# Altium footprint library FootPrintLib_12.PcbLib: 319 footprints (part 7 of 20)
Each footprint in its own frame and in the unit in brackets; x right, y up, seen from the top. Pads: shape width x height; smd on the part's side, far side on the other; paste and mask are expansions set on the pad; w line width, h text height; cw(c..) or ccw(c..) is an arc to the next point about the centre after c.
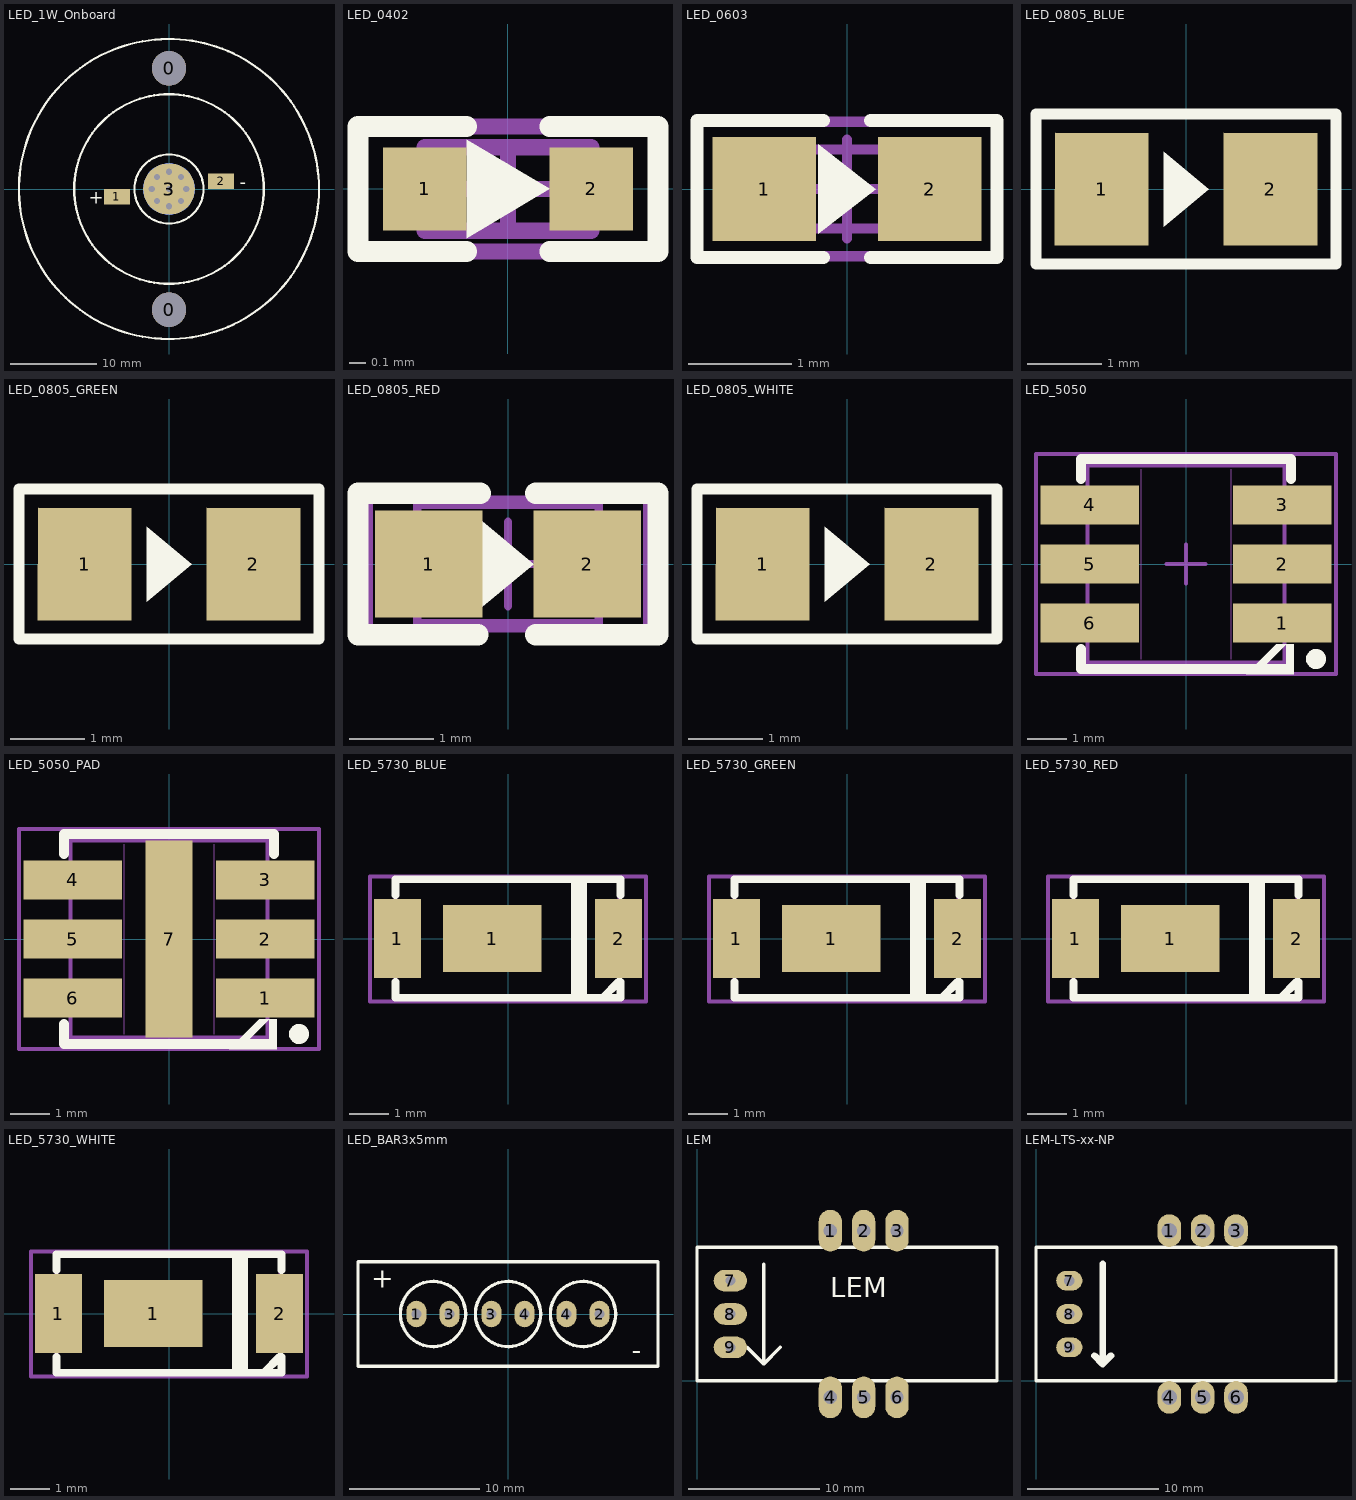
[diagram p6: the footprints below, top view; thin cyan lines are the x and y axes]

## LED_1W_Onboard [mm]
pads (6):
  round 4 hole 4: 0(0,-14) 0(0,14)
  rect 3.048x1.778 smd: 1(-6.032,-0.889) 2(6.032,0.889)
  round 6 smd: 3(0,0)
  round 6 smd far side: 3(0,0)
via 1.4,-1.4 diameter 1.27 hole 0.711
via -1.4,-1.4 diameter 1.27 hole 0.711
via -1.4,1.4 diameter 1.27 hole 0.711
via 1.4,1.4 diameter 1.27 hole 0.711
via 0,-2 diameter 1.27 hole 0.711
via 0,2 diameter 1.27 hole 0.711
via -2,0 diameter 1.27 hole 0.711
via 2,0 diameter 1.27 hole 0.711
via 0,0 diameter 1.27 hole 0.711
Top Overlay:
  circle w0.254: c0,0 r17.4
  circle w0.254: c0,0 r4
  circle w0.254: c0,0 r11
  text "-" at 8.2,0.1 h1.52
  text "+" at -9.3,-1.7 h1.52

## LED_0402 [mil] "Surface mount LED 0402"
height 11.81
pads (2):
  rect 20x20 smd: 1(-20,0) 2(20,0)
Top Overlay:
  region: -9.84,11.81 10,0 -9.84,-11.81
  lines w5: -10,-15 -36,-15 -36,15 -10,15 ; 10,-15 36,-15 36,15 10,15
Mechanical 13:
  lines w3.94: -20,-10 20,-10 20,10 -20,10 -20,-10
Mechanical 15:
  lines w3.94: -10,0 10,0 ; 0,-10 0,10 ; -36,-15 36,-15 36,15 -36,15 -36,-15
3D body "User Library-0402(1005M) LED.step": height 17.72, standoff 0, extent -19.88,-9.84 19.89,9.85

## LED_0603 [mm] "Surface mount LED 0603"
height 0.85
pads (2):
  rect 1x1 smd: 1(-0.8,0) 2(0.8,0)
Top Overlay:
  region: -0.279,0.432 0.279,0 -0.279,-0.432
  lines w0.127: -0.229,-0.66 -1.448,-0.66 -1.448,0.66 -0.229,0.66 ; 0.229,-0.66 1.448,-0.66 1.448,0.66 0.229,0.66
Mechanical 13:
  lines w0.1: -1.016,-0.381 -1.016,0.381 1.016,0.381 1.016,-0.381 -1.016,-0.381
Mechanical 15:
  lines w0.1: -0.475,0 0.475,0 ; 0,-0.475 0,0.475 ; -1.448,-0.65 -1.448,0.65 1.448,0.65 1.448,-0.65 -1.448,-0.65
3D body "User Library-0603(1608M) LED.step": height 0.6, standoff 0, extent -0.81,-0.4 0.81,0.4

## LED_0805_BLUE [mil] "Surface mount LED 0805"
height 109.84
pads (2):
  rect 50x60 smd: 1(-45,0) 2(45,0)
Top Overlay:
  region: -12,20 12,0 -12,-20
  lines w6: -80,-40 -80,40 80,40 80,-40 -80,-40
3D body "SW3dPS-APA3010GCCK_BLUE.STEP": height 76.77, standoff -1.97, extent -59.05,-19.58 59.06,19.59

## LED_0805_GREEN [mil] "Surface mount LED 0805"
height 109.84
pads (2):
  rect 50x60 smd: 1(-45,0) 2(45,0)
Top Overlay:
  region: -12,20 12,0 -12,-20
  lines w6: -80,-40 -80,40 80,40 80,-40 -80,-40
3D body "SW3dPS-led805.STEP": height 43.31, standoff -0.5, extent -40,-24.99 40,25

## LED_0805_RED [mil] "Surface mount LED 0805"
height 60
pads (2):
  rect 50x50 smd: 1(-37,0) 2(37,0)
Top Overlay:
  region: -12,20 12,0 -12,-20
  lines w10: -14,-33 -70,-33 -70,33 -13,33 ; 13,-33 70,-33 70,33 13,33
Mechanical 13:
  lines w3.94: -42.32,-27.56 42.32,-27.56 42.32,27.56 -42.32,27.56 -42.32,-27.56
Mechanical 15:
  lines w3.94: -19.69,0 19.68,0 ; 0,-19.68 0,19.69 ; -65,-30 65,-30 65,30 -65,30 -65,-30
3D body "User Library-CHIPLED-0805.STEP": height 35.43, standoff -0.39, extent -41.34,-26.57 41.33,26.58

## LED_0805_WHITE [mil] "Surface mount LED 0805"
height 109.84
pads (2):
  rect 50x60 smd: 1(-45,0) 2(45,0)
Top Overlay:
  region: -12,20 12,0 -12,-20
  lines w6: -80,-40 80,-40 80,40 -80,40 -80,-40
3D body "SW3dPS-LED_SMD_SML010L.STEP": height 53.52, standoff 0.38, extent -64.96,-27.56 64.96,29.53

## LED_5050 [mm] "SMT LED"
height 1.3
pads (6):
  rect 2.5x1 smd: 1(2.45,-1.5) 2(2.45,0) 3(2.45,1.5) 4(-2.45,1.5) 5(-2.45,0) 6(-2.45,-1.5)
Top Overlay:
  circle w0.254: c3.302,-2.413 r0.127
  region: 1.524,-2.794 2.73,-2.794 2.73,-2.032 2.54,-2.032 2.54,-2.54 2.032,-2.54 2.54,-2.032 2.286,-2.032
  lines w0.254: -2.667,-2.159 -2.667,-2.667 1.778,-2.667 ; -2.667,2.159 -2.667,2.667 2.667,2.667 2.667,2.159
Mechanical 13:
  lines w0.02: -1.143,-2.413 -1.143,2.413 ; 1.143,-2.413 1.143,2.413
  lines w0.1: -2.5,-2.5 -2.5,2.5 2.5,2.5 2.5,-2.5 -2.5,-2.5
Mechanical 15:
  lines w0.1: -0.5,0 0.5,0 ; 0,-0.5 0,0.5 ; -3.81,-2.794 -3.81,2.794 3.81,2.794 3.81,-2.794 -3.81,-2.794
3D body "User Library-LED-SMD-5050.step": height 1.6, standoff 0, extent -2.65,-2.5 2.65,2.5

## LED_5050_PAD [mm] "SMT LED"
height 1.3
pads (7):
  rect 2.5x1 smd: 1(2.45,-1.5) 2(2.45,0) 3(2.45,1.5) 4(-2.45,1.5) 5(-2.45,0) 6(-2.45,-1.5)
  rect 1.2x5 smd: 7(0,0)
Top Overlay:
  circle w0.254: c3.302,-2.413 r0.127
  region: 1.524,-2.794 2.73,-2.794 2.73,-2.032 2.54,-2.032 2.54,-2.54 2.032,-2.54 2.54,-2.032 2.286,-2.032
  lines w0.254: -2.667,-2.159 -2.667,-2.667 1.778,-2.667 ; -2.667,2.159 -2.667,2.667 2.667,2.667 2.667,2.159
Mechanical 13:
  lines w0.02: -1.143,-2.413 -1.143,2.413 ; 1.143,-2.413 1.143,2.413
  lines w0.1: -2.5,-2.5 -2.5,2.5 2.5,2.5 2.5,-2.5 -2.5,-2.5
Mechanical 15:
  lines w0.1: -0.5,0 0.5,0 ; 0,-0.5 0,0.5 ; -3.81,-2.794 -3.81,2.794 3.81,2.794 3.81,-2.794 -3.81,-2.794
3D body "User Library-LED-SMD-5050.step": height 1.6, standoff 0, extent -2.65,-2.5 2.65,2.5

## LED_5730_BLUE [mm] "SMT LED 5730 Package"
height 0.85
pads (3):
  rect 1.2x2 smd: 1(-2.8,0) 2(2.8,0)
  rect 2.5x1.7 smd: 1(-0.4,0)
Top Overlay:
  rectangle: 1.6,-1.5 2,1.5
  lines w0.2: -2.85,-1.1 -2.85,-1.5 2.85,-1.5 2.85,-1.1 ; -2.85,1.1 -2.85,1.5 2.85,1.5 2.85,1.1 ; 2.4,-1.5 2.8,-1.1
Mechanical 13:
  lines w0.1: -2.85,-1.5 2.825,-1.5 2.825,1.475 -2.85,1.475 -2.85,-1.5
Mechanical 15:
  lines w0.1: -0.5,0 0.5,0 ; 0,-0.5 0,0.5 ; -3.5,-1.6 -3.5,1.575 3.5,1.575 3.5,-1.6 -3.5,-1.6
3D body "B.STEP": height 0.9, standoff 0, extent -2.839,-1.499 2.861,1.501

## LED_5730_GREEN [mm] "SMT LED 5730 Package"
height 0.85
pads (3):
  rect 1.2x2 smd: 1(-2.8,0) 2(2.8,0)
  rect 2.5x1.7 smd: 1(-0.4,0)
Top Overlay:
  rectangle: 1.6,-1.5 2,1.5
  lines w0.2: -2.85,-1.1 -2.85,-1.5 2.85,-1.5 2.85,-1.1 ; -2.85,1.1 -2.85,1.5 2.85,1.5 2.85,1.1 ; 2.4,-1.5 2.8,-1.1
Mechanical 13:
  lines w0.1: -2.85,-1.5 -2.85,1.475 2.825,1.475 2.825,-1.5 -2.85,-1.5
Mechanical 15:
  lines w0.1: -0.5,0 0.5,0 ; 0,-0.5 0,0.5 ; -3.5,-1.6 3.5,-1.6 3.5,1.575 -3.5,1.575 -3.5,-1.6
3D body "G.STEP": height 0.9, standoff 0, extent -2.845,-1.5 2.855,1.5

## LED_5730_RED [mm] "SMT LED 5730 Package"
height 0.85
pads (3):
  rect 1.2x2 smd: 1(-2.8,0) 2(2.8,0)
  rect 2.5x1.7 smd: 1(-0.4,0)
Top Overlay:
  rectangle: 1.6,-1.5 2,1.5
  lines w0.2: -2.85,-1.1 -2.85,-1.5 2.85,-1.5 2.85,-1.1 ; -2.85,1.1 -2.85,1.5 2.85,1.5 2.85,1.1 ; 2.4,-1.5 2.8,-1.1
Mechanical 13:
  lines w0.1: -2.85,-1.5 -2.85,1.475 2.825,1.475 2.825,-1.5 -2.85,-1.5
Mechanical 15:
  lines w0.1: -0.5,0 0.5,0 ; 0,-0.5 0,0.5 ; -3.5,-1.6 3.5,-1.6 3.5,1.575 -3.5,1.575 -3.5,-1.6
3D body "R.STEP": height 0.9, standoff 0, extent -2.845,-1.499 2.855,1.501

## LED_5730_WHITE [mm] "SMT LED 5730 Package"
height 0.85
pads (3):
  rect 1.2x2 smd: 1(-2.8,0) 2(2.8,0)
  rect 2.5x1.7 smd: 1(-0.4,0)
Top Overlay:
  rectangle: 1.6,-1.5 2,1.5
  lines w0.2: -2.85,-1.1 -2.85,-1.5 2.85,-1.5 2.85,-1.1 ; -2.85,1.1 -2.85,1.5 2.85,1.5 2.85,1.1 ; 2.4,-1.5 2.8,-1.1
Mechanical 13:
  lines w0.1: -2.85,-1.5 -2.85,1.475 2.825,1.475 2.825,-1.5 -2.85,-1.5
Mechanical 15:
  lines w0.1: -0.5,0 0.5,0 ; 0,-0.5 0,0.5 ; -3.5,-1.6 3.5,-1.6 3.5,1.575 -3.5,1.575 -3.5,-1.6
3D body "User Library-PLCC-2white.STEP": height 0.9, standoff 0, extent -2.86,-1.51 2.84,1.49

## LED_BAR3x5mm [mil]
height 511.81
pads (6):
  oval 60x80 hole 30: 1(-276.38,0) 2(276.38,0) 3(-176.38,0) 3(-50,0) 4(50,0) 4(176.38,0)
Top Overlay:
  circle w10: c-226.38,0 r98.43
  circle w10: c226.38,0 r98.43
  circle w10: c0,0 r98.43
  lines w10: -452.76,-157.48 -452.76,157.48 452.76,157.48 452.76,-157.48 -452.76,-157.48
  text "+" at -413.39,78.74 h60
  text "-" at 374.02,-137.8 h60

## LEM [mil]
pads (9):
  oval 70x125 hole 40: 1(400,450) 2(500,450) 3(600,450) 4(400,-50) 5(500,-50) 6(600,-50)
  oval 100x65 hole 30: 7(100,300) 8(100,200) 9(100,100)
Top Overlay:
  lines w10: 150,100 200,50 ; 200,350 200,50 ; 250,100 200,50 ; 0,0 900,0 900,400 0,400 0,0
  text "LEM" at 400,250 h60

## LEM-LTS-xx-NP [mm]
pads (9):
  oval 1.8x2.5 hole 1.2: 1(10.16,11.43) 2(12.7,11.43) 3(15.24,11.43) 4(10.16,-1.27) 5(12.7,-1.27) 6(15.24,-1.27)
  oval 2x1.5 hole 0.8: 7(2.54,7.62) 8(2.54,5.08) 9(2.54,2.54)
Top Overlay:
  lines w0.254: 0,0 0,10.16 22.86,10.16 22.86,0 0,0
  lines w0.508: 4.445,1.905 5.08,1.27 ; 5.08,8.89 5.08,1.27 ; 5.715,1.905 5.08,1.27